# Altium footprint library SMA.PcbLib: 1 footprints
Each footprint in its own frame and in the unit in brackets; x right, y up, seen from the top. Pads: shape width x height; smd on the part's side, far side on the other; paste and mask are expansions set on the pad; w line width, h text height; cw(c..) or ccw(c..) is an arc to the next point about the centre after c.
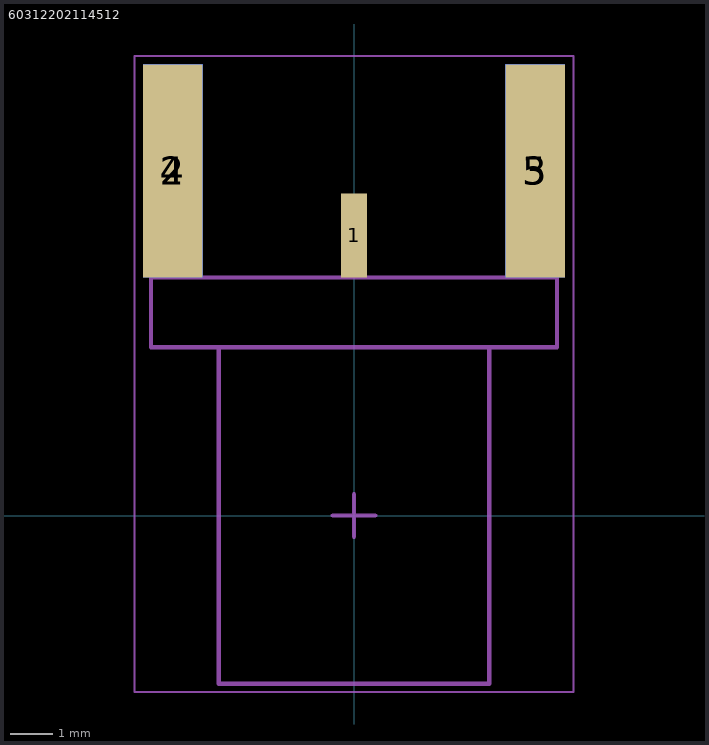
[diagram p0: the footprint, top view; thin cyan lines are the x and y axes]

## 60312202114512 [mm] "SMA PCB End Launch Jack Flat  Tab for 1.1mm PCB"
height 7.92
pads (5):
  rect 0.61x1.97 smd: 1(0,6.57)
  rect 1.4x5 smd: 2(-4.25,8.085) 3(4.25,8.085)
  rect 1.4x5 smd far side: 4(-4.25,8.085) 5(4.25,8.085)
Assembly Notes:
  lines w0.1: -4.76,5.585 4.76,5.585
  text "PCB End" at -1.5,4.885 h0.8
  text "PCB Thickness 1.1mm" at -3.7,-4.615 h0.8
Top Assembly:
  lines w0.1: -3.175,3.945 -3.175,-3.945 3.175,-3.945 3.175,3.945 ; -4.76,3.945 -4.76,10.345 -3.74,10.345 -3.74,5.585 -0.255,5.585 -0.255,7.485 0.255,7.485 0.255,5.585 3.74,5.585 3.74,10.345 4.76,10.345 4.76,3.945 -4.76,3.945
Top Designator:
  text ".Designator" at -3.647,-0.357 h1
Top Courtyard:
  lines w0.05: -5.15,-4.145 -5.15,10.785 5.15,10.785 5.15,-4.145 -5.15,-4.145
Top Component Center:
  lines w0.1: -0.5,0 0.5,0 ; 0,-0.5 0,0.5
3D body "60312202114512.stp": height 4.11, standoff -3.82, extent -4.76,-3.945 4.76,10.345